# Altium footprint library STM32系列.PcbLib: 18 footprints (part 2 of 2)
Each footprint in its own frame and in the unit in brackets; x right, y up, seen from the top. Pads: shape width x height; smd on the part's side, far side on the other; paste and mask are expansions set on the pad; w line width, h text height; cw(c..) or ccw(c..) is an arc to the next point about the centre after c.
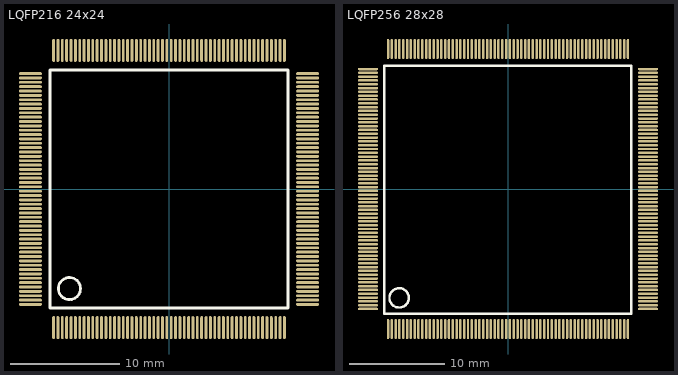
[diagram p1: the footprints below, top view; thin cyan lines are the x and y axes]

## LQFP216 24x24 [mm]
pads (216):
  oval 0.26x2.1 smd: 1(-10.6,-12.727) 2(-10.2,-12.727) 3(-9.8,-12.727) 4(-9.4,-12.727) 5(-9,-12.727) 6(-8.6,-12.727) 7(-8.2,-12.727) 8(-7.8,-12.727) 9(-7.4,-12.727) 10(-7,-12.727) 11(-6.6,-12.727) 12(-6.2,-12.727) 13(-5.8,-12.727) 14(-5.4,-12.727) 15(-5,-12.727) 16(-4.6,-12.727) 17(-4.2,-12.727) 18(-3.8,-12.727) 19(-3.4,-12.727) 20(-3,-12.727) 21(-2.6,-12.727) 22(-2.2,-12.727) 23(-1.8,-12.727) 24(-1.4,-12.727) 25(-1,-12.727) 26(-0.6,-12.727) 27(-0.2,-12.727) 28(0.2,-12.727) 29(0.6,-12.727) 30(1,-12.727) 31(1.4,-12.727) 32(1.8,-12.727) 33(2.2,-12.727) 34(2.6,-12.727) 35(3,-12.727) 36(3.4,-12.727) 37(3.8,-12.727) 38(4.2,-12.727) 39(4.6,-12.727) 40(5,-12.727) 41(5.4,-12.727) 42(5.8,-12.727) 43(6.2,-12.727) 44(6.6,-12.727) 45(7,-12.727) 46(7.4,-12.727) 47(7.8,-12.727) 48(8.2,-12.727) 49(8.6,-12.727) 50(9,-12.727) 51(9.4,-12.727) 52(9.8,-12.727) 53(10.2,-12.727) 54(10.6,-12.727) 109(10.6,12.727) 110(10.2,12.727) 111(9.8,12.727) 112(9.4,12.727) 113(9,12.727) 114(8.6,12.727) 115(8.2,12.727) 116(7.8,12.727) 117(7.4,12.727) 118(7,12.727) 119(6.6,12.727) 120(6.2,12.727) 121(5.8,12.727) 122(5.4,12.727) 123(5,12.727) 124(4.6,12.727) 125(4.2,12.727) 126(3.8,12.727) 127(3.4,12.727) 128(3,12.727) 129(2.6,12.727) 130(2.2,12.727) 131(1.8,12.727) 132(1.4,12.727) 133(1,12.727) 134(0.6,12.727) 135(0.2,12.727) 136(-0.2,12.727) 137(-0.6,12.727) 138(-1,12.727) 139(-1.4,12.727) 140(-1.8,12.727) 141(-2.2,12.727) 142(-2.6,12.727) 143(-3,12.727) 144(-3.4,12.727) 145(-3.8,12.727) 146(-4.2,12.727) 147(-4.6,12.727) 148(-5,12.727) 149(-5.4,12.727) 150(-5.8,12.727) 151(-6.2,12.727) 152(-6.6,12.727) 153(-7,12.727) 154(-7.4,12.727) 155(-7.8,12.727) 156(-8.2,12.727) 157(-8.6,12.727) 158(-9,12.727) 159(-9.4,12.727) 160(-9.8,12.727) 161(-10.2,12.727) 162(-10.6,12.727)
  oval 2.1x0.26 smd: 55(12.727,-10.6) 56(12.727,-10.2) 57(12.727,-9.8) 58(12.727,-9.4) 59(12.727,-9) 60(12.727,-8.6) 61(12.727,-8.2) 62(12.727,-7.8) 63(12.727,-7.4) 64(12.727,-7) 65(12.727,-6.6) 66(12.727,-6.2) 67(12.727,-5.8) 68(12.727,-5.4) 69(12.727,-5) 70(12.727,-4.6) 71(12.727,-4.2) 72(12.727,-3.8) 73(12.727,-3.4) 74(12.727,-3) 75(12.727,-2.6) 76(12.727,-2.2) 77(12.727,-1.8) 78(12.727,-1.4) 79(12.727,-1) 80(12.727,-0.6) 81(12.727,-0.2) 82(12.727,0.2) 83(12.727,0.6) 84(12.727,1) 85(12.727,1.4) 86(12.727,1.8) 87(12.727,2.2) 88(12.727,2.6) 89(12.727,3) 90(12.727,3.4) 91(12.727,3.8) 92(12.727,4.2) 93(12.727,4.6) 94(12.727,5) 95(12.727,5.4) 96(12.727,5.8) 97(12.727,6.2) 98(12.727,6.6) 99(12.727,7) 100(12.727,7.4) 101(12.727,7.8) 102(12.727,8.2) 103(12.727,8.6) 104(12.727,9) 105(12.727,9.4) 106(12.727,9.8) 107(12.727,10.2) 108(12.727,10.6) 163(-12.727,10.6) 164(-12.727,10.2) 165(-12.727,9.8) 166(-12.727,9.4) 167(-12.727,9) 168(-12.727,8.6) 169(-12.727,8.2) 170(-12.727,7.8) 171(-12.727,7.4) 172(-12.727,7) 173(-12.727,6.6) 174(-12.727,6.2) 175(-12.727,5.8) 176(-12.727,5.4) 177(-12.727,5) 178(-12.727,4.6) 179(-12.727,4.2) 180(-12.727,3.8) 181(-12.727,3.4) 182(-12.727,3) 183(-12.727,2.6) 184(-12.727,2.2) 185(-12.727,1.8) 186(-12.727,1.4) 187(-12.727,1) 188(-12.727,0.6) 189(-12.727,0.2) 190(-12.727,-0.2) 191(-12.727,-0.6) 192(-12.727,-1) 193(-12.727,-1.4) 194(-12.727,-1.8) 195(-12.727,-2.2) 196(-12.727,-2.6) 197(-12.727,-3) 198(-12.727,-3.4) 199(-12.727,-3.8) 200(-12.727,-4.2) 201(-12.727,-4.6) 202(-12.727,-5) 203(-12.727,-5.4) 204(-12.727,-5.8) 205(-12.727,-6.2) 206(-12.727,-6.6) 207(-12.727,-7) 208(-12.727,-7.4) 209(-12.727,-7.8) 210(-12.727,-8.2) 211(-12.727,-8.6) 212(-12.727,-9) 213(-12.727,-9.4) 214(-12.727,-9.8) 215(-12.727,-10.2) 216(-12.727,-10.6)
Top Overlay:
  circle w0.254: c-9.144,-9.144 r1.016
  lines w0.254: -10.922,-10.922 10.922,-10.922 10.922,10.922 -10.922,10.922 -10.922,-10.922
3D body "LQFP216 24x24.STEP": height 1.45, standoff 0, extent -13.005,-13.001 13.001,13.005

## LQFP256 28x28 [mm]
pads (256):
  oval 0.26x2.1 smd: 1(-12.6,-14.702) 2(-12.2,-14.702) 3(-11.8,-14.702) 4(-11.4,-14.702) 5(-11,-14.702) 6(-10.6,-14.702) 7(-10.2,-14.702) 8(-9.8,-14.702) 9(-9.4,-14.702) 10(-9,-14.702) 11(-8.6,-14.702) 12(-8.2,-14.702) 13(-7.8,-14.702) 14(-7.4,-14.702) 15(-7,-14.702) 16(-6.6,-14.702) 17(-6.2,-14.702) 18(-5.8,-14.702) 19(-5.4,-14.702) 20(-5,-14.702) 21(-4.6,-14.702) 22(-4.2,-14.702) 23(-3.8,-14.702) 24(-3.4,-14.702) 25(-3,-14.702) 26(-2.6,-14.702) 27(-2.2,-14.702) 28(-1.8,-14.702) 29(-1.4,-14.702) 30(-1,-14.702) 31(-0.6,-14.702) 32(-0.2,-14.702) 33(0.2,-14.702) 34(0.6,-14.702) 35(1,-14.702) 36(1.4,-14.702) 37(1.8,-14.702) 38(2.2,-14.702) 39(2.6,-14.702) 40(3,-14.702) 41(3.4,-14.702) 42(3.8,-14.702) 43(4.2,-14.702) 44(4.6,-14.702) 45(5,-14.702) 46(5.4,-14.702) 47(5.8,-14.702) 48(6.2,-14.702) 49(6.6,-14.702) 50(7,-14.702) 51(7.4,-14.702) 52(7.8,-14.702) 53(8.2,-14.702) 54(8.6,-14.702) 55(9,-14.702) 56(9.4,-14.702) 57(9.8,-14.702) 58(10.2,-14.702) 59(10.6,-14.702) 60(11,-14.702) 61(11.4,-14.702) 62(11.8,-14.702) 63(12.2,-14.702) 64(12.6,-14.702) 129(12.6,14.702) 130(12.2,14.702) 131(11.8,14.702) 132(11.4,14.702) 133(11,14.702) 134(10.6,14.702) 135(10.2,14.702) 136(9.8,14.702) 137(9.4,14.702) 138(9,14.702) 139(8.6,14.702) 140(8.2,14.702) 141(7.8,14.702) 142(7.4,14.702) 143(7,14.702) 144(6.6,14.702) 145(6.2,14.702) 146(5.8,14.702) 147(5.4,14.702) 148(5,14.702) 149(4.6,14.702) 150(4.2,14.702) 151(3.8,14.702) 152(3.4,14.702) 153(3,14.702) 154(2.6,14.702) 155(2.2,14.702) 156(1.8,14.702) 157(1.4,14.702) 158(1,14.702) 159(0.6,14.702) 160(0.2,14.702) 161(-0.2,14.702) 162(-0.6,14.702) 163(-1,14.702) 164(-1.4,14.702) 165(-1.8,14.702) 166(-2.2,14.702) 167(-2.6,14.702) 168(-3,14.702) 169(-3.4,14.702) 170(-3.8,14.702) 171(-4.2,14.702) 172(-4.6,14.702) 173(-5,14.702) 174(-5.4,14.702) 175(-5.8,14.702) 176(-6.2,14.702) 177(-6.6,14.702) 178(-7,14.702) 179(-7.4,14.702) 180(-7.8,14.702) 181(-8.2,14.702) 182(-8.6,14.702) 183(-9,14.702) 184(-9.4,14.702) 185(-9.8,14.702) 186(-10.2,14.702) 187(-10.6,14.702) 188(-11,14.702) 189(-11.4,14.702) 190(-11.8,14.702) 191(-12.2,14.702) 192(-12.6,14.702)
  oval 2.1x0.26 smd: 65(14.702,-12.6) 66(14.702,-12.2) 67(14.702,-11.8) 68(14.702,-11.4) 69(14.702,-11) 70(14.702,-10.6) 71(14.702,-10.2) 72(14.702,-9.8) 73(14.702,-9.4) 74(14.702,-9) 75(14.702,-8.6) 76(14.702,-8.2) 77(14.702,-7.8) 78(14.702,-7.4) 79(14.702,-7) 80(14.702,-6.6) 81(14.702,-6.2) 82(14.702,-5.8) 83(14.702,-5.4) 84(14.702,-5) 85(14.702,-4.6) 86(14.702,-4.2) 87(14.702,-3.8) 88(14.702,-3.4) 89(14.702,-3) 90(14.702,-2.6) 91(14.702,-2.2) 92(14.702,-1.8) 93(14.702,-1.4) 94(14.702,-1) 95(14.702,-0.6) 96(14.702,-0.2) 97(14.702,0.2) 98(14.702,0.6) 99(14.702,1) 100(14.702,1.4) 101(14.702,1.8) 102(14.702,2.2) 103(14.702,2.6) 104(14.702,3) 105(14.702,3.4) 106(14.702,3.8) 107(14.702,4.2) 108(14.702,4.6) 109(14.702,5) 110(14.702,5.4) 111(14.702,5.8) 112(14.702,6.2) 113(14.702,6.6) 114(14.702,7) 115(14.702,7.4) 116(14.702,7.8) 117(14.702,8.2) 118(14.702,8.6) 119(14.702,9) 120(14.702,9.4) 121(14.702,9.8) 122(14.702,10.2) 123(14.702,10.6) 124(14.702,11) 125(14.702,11.4) 126(14.702,11.8) 127(14.702,12.2) 128(14.702,12.6) 193(-14.702,12.6) 194(-14.702,12.2) 195(-14.702,11.8) 196(-14.702,11.4) 197(-14.702,11) 198(-14.702,10.6) 199(-14.702,10.2) 200(-14.702,9.8) 201(-14.702,9.4) 202(-14.702,9) 203(-14.702,8.6) 204(-14.702,8.2) 205(-14.702,7.8) 206(-14.702,7.4) 207(-14.702,7) 208(-14.702,6.6) 209(-14.702,6.2) 210(-14.702,5.8) 211(-14.702,5.4) 212(-14.702,5) 213(-14.702,4.6) 214(-14.702,4.2) 215(-14.702,3.8) 216(-14.702,3.4) 217(-14.702,3) 218(-14.702,2.6) 219(-14.702,2.2) 220(-14.702,1.8) 221(-14.702,1.4) 222(-14.702,1) 223(-14.702,0.6) 224(-14.702,0.2) 225(-14.702,-0.2) 226(-14.702,-0.6) 227(-14.702,-1) 228(-14.702,-1.4) 229(-14.702,-1.8) 230(-14.702,-2.2) 231(-14.702,-2.6) 232(-14.702,-3) 233(-14.702,-3.4) 234(-14.702,-3.8) 235(-14.702,-4.2) 236(-14.702,-4.6) 237(-14.702,-5) 238(-14.702,-5.4) 239(-14.702,-5.8) 240(-14.702,-6.2) 241(-14.702,-6.6) 242(-14.702,-7) 243(-14.702,-7.4) 244(-14.702,-7.8) 245(-14.702,-8.2) 246(-14.702,-8.6) 247(-14.702,-9) 248(-14.702,-9.4) 249(-14.702,-9.8) 250(-14.702,-10.2) 251(-14.702,-10.6) 252(-14.702,-11) 253(-14.702,-11.4) 254(-14.702,-11.8) 255(-14.702,-12.2) 256(-14.702,-12.6)
Top Overlay:
  circle w0.254: c-11.43,-11.43 r1.016
  lines w0.254: -13,-13.081 -13,12.954 12.954,12.954 12.954,-13.081 -13,-13.081
3D body "LQFP256 28x28.STEP": height 1.45, standoff 0, extent -15.011,-14.994 14.994,15.011